# Altium footprint library WR-MJ.PcbLib: 101 footprints (part 5 of 7)
Each footprint in its own frame and in the unit in brackets; x right, y up, seen from the top. Pads: shape width x height; smd on the part's side, far side on the other; paste and mask are expansions set on the pad; w line width, h text height; cw(c..) or ccw(c..) is an arc to the next point about the centre after c.
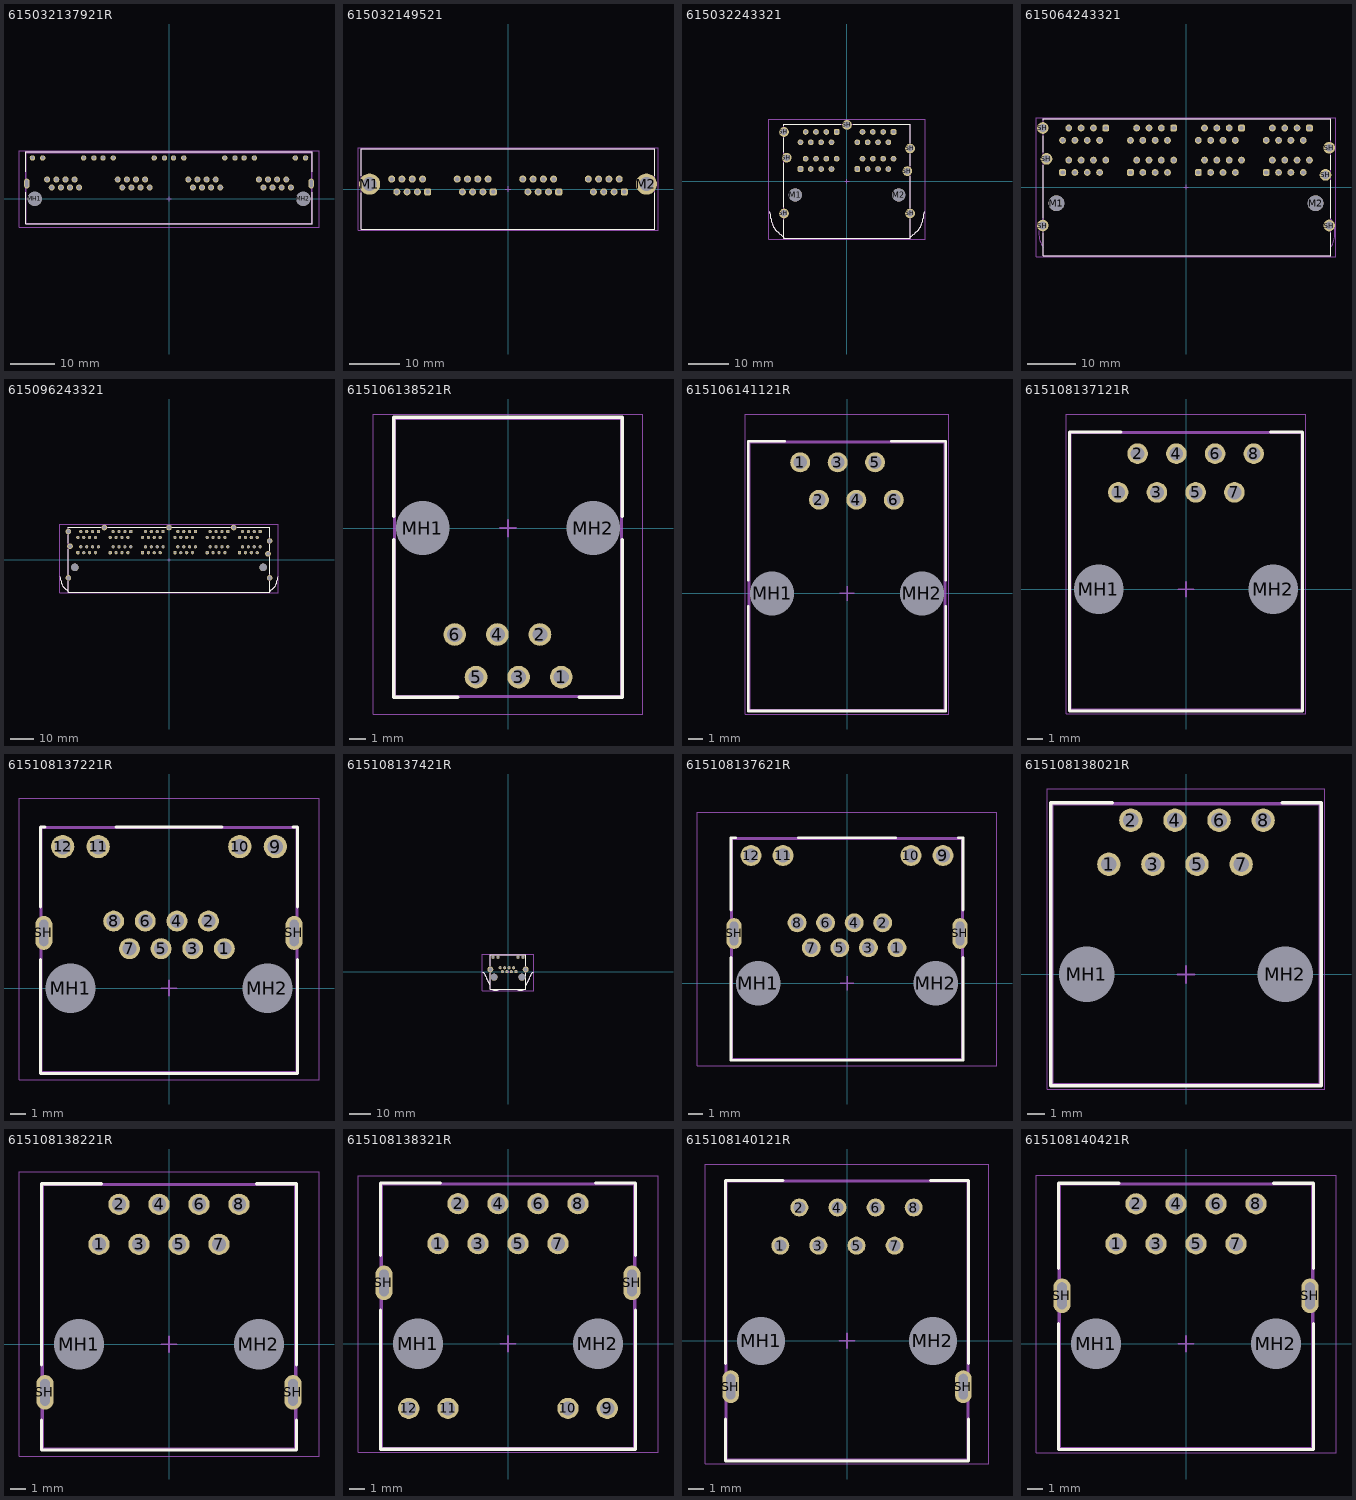
[diagram p4: the footprints below, top view; thin cyan lines are the x and y axes]

## 615032137921R [mm] "Modular Jak"
pads (52):
  round 1.35 hole 0.9: A1(-20.055,2.54) A2(-21.075,4.32) A3(-22.095,2.54) A4(-23.115,4.32) A5(-24.135,2.54) A6(-25.155,4.32) A7(-26.175,2.54) A8(-27.195,4.32) B1(-4.305,2.54) B2(-5.325,4.32) B3(-6.345,2.54) B4(-7.365,4.32) B5(-8.385,2.54) B6(-9.405,4.32) B7(-10.425,2.54) B8(-11.445,4.32) C1(11.445,2.54) C2(10.425,4.32) C3(9.405,2.54) C4(8.385,4.32) C5(7.365,2.54) C6(6.345,4.32) C7(5.325,2.54) C8(4.305,4.32) D1(27.195,2.54) D2(26.175,4.32) D3(25.155,2.54) D4(24.135,4.32) D5(23.115,2.54) D6(22.095,4.32) D7(21.075,2.54) D8(20.055,4.32)
  round 1.2 hole 0.8: A9(-16.765,9.14) A10(-19.055,9.14) A11(-28.195,9.14) A12(-30.485,9.14) B9(-1.015,9.14) B10(-3.305,9.14) B11(-12.445,9.14) B12(-14.735,9.14) C9(14.735,9.14) C10(12.445,9.14) C11(3.305,9.14) C12(1.015,9.14) D9(30.485,9.14) D10(28.195,9.14) D11(19.055,9.14) D12(16.765,9.14)
  round 3.15 hole 3.25 unplated: MH1(-29.975,0) MH2(29.975,0)
  oval 1.2x2.2 hole 0.6 slot 1.6 at 90 deg: SH(-31.75,3.43) SH(31.75,3.43)
Top Overlay:
  lines w0.2: -32,1.5 -32,-5.525 32,-5.525 32,1.5 ; -32,6.1 -32,10.475 32,10.475 32,6.1
Top Paste:
  drawing of 50 lines, arcs and shapes, not listed
Assembly Notes:
  text "Stencil Thickness 120 um" at -10.109,-7.841 h2
Top Assembly:
  lines w0.1: -32,-5.525 -32,10.475 32,10.475 32,-5.525 -32,-5.525
Top Designator:
  text ".Designator" at -3.647,-0.357 h1
Top 3D Body:
  lines w0.1: -31.875,-5.4 31.875,-5.4 31.875,10.35 -31.875,10.35 -31.875,-5.4
Top Courtyard:
  lines w0.05: -33.481,-6.38 -33.481,10.8 33.481,10.8 33.481,-6.38 -33.481,-6.38
Top Component Center:
  lines w0.1: -0.5,0 0.5,0 ; 0,-0.5 0,0.5
3D body "615032137921R.stp": height 14.83, standoff -3.51, extent -33.281,-6.18 33.281,10.6

## 615032149521 [mm] "Modular Jack Horizontal Plastic 8P8C Assembly Tab Up"
height 15.4
pads (34):
  rrect50% 1.4x1.4 hole 0.9: A1(-15.93,-0.57) B1(-2.93,-0.57) C1(10.07,-0.57) D1(23.07,-0.57)
  round 1.4 hole 0.9: A2(-16.95,1.97) A3(-17.97,-0.57) A4(-18.99,1.97) A5(-20.01,-0.57) A6(-21.03,1.97) A7(-22.05,-0.57) A8(-23.07,1.97) B2(-3.95,1.97) B3(-4.97,-0.57) B4(-5.99,1.97) B5(-7.01,-0.57) B6(-8.03,1.97) B7(-9.05,-0.57) B8(-10.07,1.97) C2(9.05,1.97) C3(8.03,-0.57) C4(7.01,1.97) C5(5.99,-0.57) C6(4.97,1.97) C7(3.95,-0.57) C8(2.93,1.97) D2(22.05,1.97) D3(21.03,-0.57) D4(20.01,1.97) D5(18.99,-0.57) D6(17.97,1.97) D7(16.95,-0.57) D8(15.93,1.97)
  round 4.2 hole 2.8: M1(-27.45,0.97) M2(27.45,0.97)
Top Overlay:
  lines w0.2: -29.14,-0.75 -29.14,-8 29.14,-8 29.14,-0.75 ; -29.14,2.65 -29.14,8 29.14,8 29.14,2.65
Top Assembly:
  lines w0.1: -29.14,-8 29.14,-8 29.14,8 -29.14,8 -29.14,-8
Top Designator:
  text ".Designator" at -3.647,-0.357 h1
Top Courtyard:
  lines w0.05: -29.75,-8.2 -29.75,8.2 29.75,8.2 29.75,-8.2 -29.75,-8.2
Top Component Center:
  lines w0.1: -0.5,0 0.5,0 ; 0,-0.5 0,0.5
3D body "615032149521.stp": height 15.53, standoff -4.01, extent -29.14,-8 29.14,8

## 615032243321 [mm] "Modular Jack Horizontal Shielded 2x Dual Stacked with EMI Panel Finger 8P8C Tab Up&Down"
height 25.29
pads (41):
  rrect50% 1.4x1.4 hole 0.89: A1(-2.54,12.17) B1(11.43,12.17) C1(-11.43,3.05) D1(2.54,3.05)
  round 1.4 hole 0.89: A2(-3.81,9.63) A3(-5.08,12.17) A4(-6.35,9.63) A5(-7.62,12.17) A6(-8.89,9.63) A7(-10.16,12.17) A8(-11.43,9.63) B2(10.16,9.63) B3(8.89,12.17) B4(7.62,9.63) B5(6.35,12.17) B6(5.08,9.63) B7(3.81,12.17) B8(2.54,9.63) C2(-10.16,5.59) C3(-8.89,3.05) C4(-7.62,5.59) C5(-6.35,3.05) C6(-5.08,5.59) C7(-3.81,3.05) C8(-2.54,5.59) D2(3.81,5.59) D3(5.08,3.05) D4(6.35,5.59) D5(7.62,3.05) D6(8.89,5.59) D7(10.16,3.05) D8(11.43,5.59)
  round 3.25 hole 3.25 unplated: M1(-12.7,-3.3) M2(12.7,-3.3)
  round 2.4 hole 1.6: SH(-15.495,-7.87) SH(-15.495,12.17) SH(-14.82,5.84) SH(0,13.9) SH(14.82,2.54) SH(15.495,-7.87) SH(15.495,8.1)
Top Overlay:
  lines w0.2: -18.991,-7.388 cw(c-27.747,-9.899) -18.677,-9.062 ccw(c-14.174,-8.889) -17.251,-12.18 ccw(c-13.756,-9.252) -16.336,-13.012 ccw(c-9.917,-7.318) -15.585,-13.76 ; -15.585,-9.35 -15.585,-14 15.585,-14 15.585,-9.34 ; -15.585,-6.39 -15.585,4.55 ; -15.585,7.13 -15.585,10.7 ; -15.585,13.64 -15.585,14 -1.485,14 ; 1.485,14 15.585,14 15.585,9.55 ; 15.585,-13.76 ccw(c9.917,-7.318) 16.336,-13.012 ccw(c13.756,-9.252) 17.252,-12.18 ccw(c14.175,-8.889) 18.677,-9.062 cw(c27.747,-9.899) 18.991,-7.388 ; 15.585,-6.4 15.585,1.28 ; 15.585,3.8 15.585,6.65
Top Assembly:
  lines w0.1: -18.991,-7.388 cw(c-27.747,-9.899) -18.677,-9.062 ccw(c-14.174,-8.889) -17.251,-12.18 ccw(c-13.756,-9.252) -16.336,-13.012 ccw(c-9.917,-7.318) -15.585,-13.76 ; 15.585,-13.76 ccw(c9.917,-7.318) 16.336,-13.012 ccw(c13.756,-9.252) 17.252,-12.18 ccw(c14.175,-8.889) 18.677,-9.062 cw(c27.747,-9.899) 18.991,-7.388 ; -15.585,-14 15.585,-14 15.585,14 -15.585,14 -15.585,-14
Top Designator:
  text ".Designator" at -3.647,-0.357 h1
Top Courtyard:
  lines w0.05: -19.285,-14.2 19.285,-14.2 19.285,15.3 -19.285,15.3 -19.285,-14.2
Top Component Center:
  lines w0.1: -0.5,0 0.5,0 ; 0,-0.5 0,0.5
3D body "615032243321 (rev1).stp": height 29.84, standoff -4.57, extent -19.085,-14 19.085,14

## 615064243321 [mm] "Modular Jack Horizontal Shielded 2x4 Stacked with EMI Panel Finger 8P8C Tab Up&Down"
height 25.3
pads (72):
  rrect50% 1.4x1.4 hole 0.9: A1(-16.51,12.14) B1(-2.54,12.14) C1(11.43,12.14) D1(25.4,12.14) E1(-25.4,3) F1(-11.43,3) G1(2.54,3) H1(16.51,3)
  round 1.4 hole 0.9: A2(-17.78,9.6) A3(-19.05,12.14) A4(-20.32,9.6) A5(-21.59,12.14) A6(-22.86,9.6) A7(-24.13,12.14) A8(-25.4,9.6) B2(-3.81,9.6) B3(-5.08,12.14) B4(-6.35,9.6) B5(-7.62,12.14) B6(-8.89,9.6) B7(-10.16,12.14) B8(-11.43,9.6) C2(10.16,9.6) C3(8.89,12.14) C4(7.62,9.6) C5(6.35,12.14) C6(5.08,9.6) C7(3.81,12.14) C8(2.54,9.6) D2(24.13,9.6) D3(22.86,12.14) D4(21.59,9.6) D5(20.32,12.14) D6(19.05,9.6) D7(17.78,12.14) D8(16.51,9.6) E2(-24.13,5.54) E3(-22.86,3) E4(-21.59,5.54) E5(-20.32,3) E6(-19.05,5.54) E7(-17.78,3) E8(-16.51,5.54) F2(-10.16,5.54) F3(-8.89,3) F4(-7.62,5.54) F5(-6.35,3) F6(-5.08,5.54) F7(-3.81,3) F8(-2.54,5.54) G2(3.81,5.54) G3(5.08,3) G4(6.35,5.54) G5(7.62,3) G6(8.89,5.54) G7(10.16,3) G8(11.43,5.54) H2(17.78,5.54) H3(19.05,3) H4(20.32,5.54) H5(21.59,3) H6(22.86,5.54) H7(24.13,3) H8(25.4,5.54)
  round 3.25 hole 3.25 unplated: M1(-26.67,-3.35) M2(26.67,-3.35)
  round 2.4 hole 1.6: SH(-29.47,-7.92) SH(-29.47,12.15) SH(-28.71,5.8) SH(28.71,2.5) SH(29.47,-7.92) SH(29.47,8.08)
Top Overlay:
  lines w0.2: -29.42,-9.45 -29.42,-14.1 29.78,-14.1 29.78,-9.45 ; -29.42,-6.4 -29.42,4.45 ; -29.42,7.15 -29.42,10.6 ; -29.42,13.7 -29.42,14.1 29.78,14.1 29.78,9.6 ; 29.78,-6.4 29.78,1.4 ; 29.78,3.6 29.78,6.55
Top Assembly:
  lines w0.1: -29.42,-12.45 cw(c-24.62,-9.45) -29.42,-6.45 ; 29.78,-12.45 ccw(c24.98,-9.45) 29.78,-6.45 ; -29.42,-14.1 -29.42,14.1 29.78,14.1 29.78,-14.1 -29.42,-14.1
Top Designator:
  text ".Designator" at -3.647,-0.357 h1
Top Courtyard:
  lines w0.05: -30.87,-14.3 30.87,-14.3 30.87,14.3 -30.87,14.3 -30.87,-14.3
Top Component Center:
  lines w0.1: -0.5,0 0.5,0 ; 0,-0.5 0,0.5
3D body "615064243321 (rev1).stp": height 26.85, standoff -3.25, extent -30.22,-14.1 30.576,14.1

## 615096243321 [mm] "Modular Jack Horizontal Shielded 2x6 Stacked with EMI Panel Finger 8P8C Tab Up&Down"
height 25.2
pads (107):
  rrect50% 1.4x1.4 hole 0.89: A1(-30.48,12.27) B1(-16.51,12.27) C1(-2.54,12.27) D1(11.43,12.27) E1(25.4,12.27) F1(39.37,12.27) G1(-39.37,3.15) H1(-25.4,3.15) I1(-11.43,3.15) J1(2.54,3.15) K1(16.51,3.15) L1(30.48,3.15)
  round 1.4 hole 0.89: A2(-31.75,9.73) A3(-33.02,12.27) A4(-34.29,9.73) A5(-35.56,12.27) A6(-36.83,9.73) A7(-38.1,12.27) A8(-39.37,9.73) B2(-17.78,9.73) B3(-19.05,12.27) B4(-20.32,9.73) B5(-21.59,12.27) B6(-22.86,9.73) B7(-24.13,12.27) B8(-25.4,9.73) C2(-3.81,9.73) C3(-5.08,12.27) C4(-6.35,9.73) C5(-7.62,12.27) C6(-8.89,9.73) C7(-10.16,12.27) C8(-11.43,9.73) D2(10.16,9.73) D3(8.89,12.27) D4(7.62,9.73) D5(6.35,12.27) D6(5.08,9.73) D7(3.81,12.27) D8(2.54,9.73) E2(24.13,9.73) E3(22.86,12.27) E4(21.59,9.73) E5(20.32,12.27) E6(19.05,9.73) E7(17.78,12.27) E8(16.51,9.73) F2(38.1,9.73) F3(36.83,12.27) F4(35.56,9.73) F5(34.29,12.27) F6(33.02,9.73) F7(31.75,12.27) F8(30.48,9.73) G2(-38.1,5.69) G3(-36.83,3.15) G4(-35.56,5.69) G5(-34.29,3.15) G6(-33.02,5.69) G7(-31.75,3.15) G8(-30.48,5.69) H2(-24.13,5.69) H3(-22.86,3.15) H4(-21.59,5.69) H5(-20.32,3.15) H6(-19.05,5.69) H7(-17.78,3.15) H8(-16.51,5.69) I2(-10.16,5.69) I3(-8.89,3.15) I4(-7.62,5.69) I5(-6.35,3.15) I6(-5.08,5.69) I7(-3.81,3.15) I8(-2.54,5.69) J2(3.81,5.69) J3(5.08,3.15) J4(6.35,5.69) J5(7.62,3.15) J6(8.89,5.69) J7(10.16,3.15) J8(11.43,5.69) K2(17.78,5.69) K3(19.05,3.15) K4(20.32,5.69) K5(21.59,3.15) K6(22.86,5.69) K7(24.13,3.15) K8(25.4,5.69) L2(31.75,5.69) L3(33.02,3.15) L4(34.29,5.69) L5(35.56,3.15) L6(36.83,5.69) L7(38.1,3.15) L8(39.37,5.69)
  round 3.25 hole 3.25 unplated: M1(-40.64,-3.2) M2(40.64,-3.2)
  round 2.4 hole 1.6: SH(-43.435,-7.77) SH(-43.435,12.27) SH(-42.76,5.94) SH(-27.94,14) SH(0,14) SH(27.94,14) SH(42.76,2.64) SH(43.435,-7.77) SH(43.435,8.2)
Top Overlay:
  lines w0.2: -46.926,-7.288 cw(c-55.682,-9.799) -46.612,-8.962 ccw(c-42.11,-8.789) -45.187,-12.08 ccw(c-41.691,-9.152) -44.271,-12.912 ccw(c-37.852,-7.218) -43.52,-13.66 ; -43.52,-9.25 -43.52,-13.9 43.52,-13.9 43.52,-9.29 ; -43.52,-6.29 -43.52,4.65 ; -43.52,7.23 -43.52,10.8 ; -43.52,13.74 -43.52,14.1 -29.42,14.1 ; -26.46,14.1 -1.47,14.1 ; 1.47,14.1 26.46,14.1 ; 29.41,14.1 43.52,14.1 43.52,9.7 ; 43.52,-13.66 ccw(c37.852,-7.218) 44.271,-12.912 ccw(c41.691,-9.152) 45.187,-12.08 ccw(c42.11,-8.789) 46.612,-8.962 cw(c55.682,-9.799) 46.926,-7.288 ; 43.52,-6.25 43.52,1.38 ; 43.52,3.9 43.52,6.7
Top Assembly:
  lines w0.1: -46.926,-7.288 cw(c-55.682,-9.799) -46.612,-8.962 ccw(c-42.11,-8.789) -45.187,-12.08 ccw(c-41.691,-9.152) -44.271,-12.912 ccw(c-37.852,-7.218) -43.52,-13.66 ; 43.52,-13.66 ccw(c37.852,-7.218) 44.271,-12.912 ccw(c41.691,-9.152) 45.187,-12.08 ccw(c42.11,-8.789) 46.612,-8.962 cw(c55.682,-9.799) 46.926,-7.288 ; -43.52,-13.9 43.52,-13.9 43.52,14.1 -43.52,14.1 -43.52,-13.9
Top Designator:
  text ".Designator" at -3.647,-0.357 h1
Top Courtyard:
  lines w0.05: -47.22,-14.1 47.22,-14.1 47.22,15.4 -47.22,15.4 -47.22,-14.1
Top Component Center:
  lines w0.1: -0.5,0 0.5,0 ; 0,-0.5 0,0.5
3D body "615096243321 (rev1).stp": height 30.15, standoff -3.15, extent -47.02,-13.9 47.02,14.1

## 615106138521R [mm] "Modular Jak"
height 16.25
pads (8):
  round 1.35 hole 0.9: 1(3.175,-8.89) 2(1.905,-6.35) 3(0.635,-8.89) 4(-0.635,-6.35) 5(-1.905,-8.89) 6(-3.175,-6.35)
  round 3.1 hole 3.2 unplated: MH1(-5.08,0) MH2(5.08,0)
Top Overlay:
  lines w0.2: -6.805,-0.7 -6.805,-10.1 -3.005,-10.1 ; -6.805,0.7 -6.805,6.6 6.805,6.6 6.805,0.7 ; 4.245,-10.1 6.805,-10.1 6.805,-0.7
Top Paste:
  region: -4.025,-4.35 -4.025,-7.55 -2.325,-7.55 -2.325,-4.35
  region: -1.485,-4.35 -1.485,-7.55 0.215,-7.55 0.215,-4.35
  region: 1.055,-4.35 1.055,-7.55 2.755,-7.55 2.755,-4.35
  region: -1.055,-10.89 -1.055,-7.69 -2.755,-7.69 -2.755,-10.89
  region: 1.485,-10.89 1.485,-7.69 -0.215,-7.69 -0.215,-10.89
  region: 4.025,-10.89 4.025,-7.69 2.325,-7.69 2.325,-10.89
Assembly Notes:
  text "Stencil Thickness 120 um" at -7.571,-12.18 h1.5
Top Assembly:
  lines w0.1: -6.805,-10.1 -6.805,6.6 6.805,6.6 6.805,-10.1 -6.805,-10.1
Top Designator:
  text ".Designator" at -3.647,-0.357 h1
Top 3D Body:
  lines w0.1: -6.73,-10 -6.73,6.5 6.73,6.5 6.73,-10 -6.73,-10
Top Courtyard:
  lines w0.05: -8.03,-11.09 8.03,-11.09 8.03,6.8 -8.03,6.8 -8.03,-11.09
Top Component Center:
  lines w0.1: -0.5,0 0.5,0 ; 0,-0.5 0,0.5
3D body "615106138521R.stp": height 16.29, standoff -1.37, extent -7.83,-10 7.83,6.5

## 615106141121R [mm] "Modular Jak"
height 25.3
pads (8):
  round 1.35 hole 0.9: 1(-3.175,8.89) 2(-1.905,6.35) 3(-0.635,8.89) 4(0.635,6.35) 5(1.905,8.89) 6(3.175,6.35)
  round 2.9 hole 3 unplated: MH1(-5.08,0) MH2(5.08,0)
Top Overlay:
  lines w0.2: -6.7,-0.9 -6.7,-7.98 6.7,-7.98 6.7,-0.9 ; -6.7,0.9 -6.7,10.32 -4.25,10.32 ; 3,10.32 6.7,10.32 6.7,0.9
Top Paste:
  region: -4.025,11.97 -2.325,11.97 -2.325,7.69 -4.025,7.69
  region: -1.485,11.97 0.215,11.97 0.215,7.69 -1.485,7.69
  region: 1.055,11.97 2.755,11.97 2.755,7.69 1.055,7.69
  region: 2.325,3.27 4.025,3.27 4.025,7.55 2.325,7.55
  region: -0.215,3.27 1.485,3.27 1.485,7.55 -0.215,7.55
  region: -2.755,3.27 -1.055,3.27 -1.055,7.55 -2.755,7.55
Top Assembly:
  lines w0.1: -6.7,-7.98 6.7,-7.98 6.7,10.32 -6.7,10.32 -6.7,-7.98
Top Designator:
  text ".Designator" at -3.647,-0.357 h1
Top 3D Body:
  lines w0.1: -6.6,-7.88 6.6,-7.88 6.6,10.22 -6.6,10.22 -6.6,-7.88
Top Courtyard:
  lines w0.05: -6.9,-8.18 6.9,-8.18 6.9,12.17 -6.9,12.17 -6.9,-8.18
Top Component Center:
  lines w0.1: -0.5,0 0.5,0 ; 0,-0.5 0,0.5
3D body "615106141121R.stp": height 11.59, standoff -1.81, extent -6.6,-7.88 6.6,10.22

## 615108137121R [mm] "Modular Jak"
pads (10):
  round 1.35 hole 0.9: 1(-4.445,6.35) 2(-3.175,8.89) 3(-1.905,6.35) 4(-0.635,8.89) 5(0.635,6.35) 6(1.905,8.89) 7(3.175,6.35) 8(4.445,8.89)
  round 3.15 hole 3.25 unplated: MH1(-5.715,0) MH2(5.715,0)
Top Overlay:
  lines w0.2: -4.25,10.32 -7.65,10.32 -7.65,-7.98 7.65,-7.98 7.65,-0.9 7.65,10.32 5.55,10.32
Top Paste:
  region: 5.295,11.29 5.295,7.69 3.595,7.69 3.595,11.29
  region: 2.755,11.29 2.755,7.69 1.055,7.69 1.055,11.29
  region: 0.215,11.29 0.215,7.69 -1.485,7.69 -1.485,11.29
  region: -2.325,11.29 -2.325,7.69 -4.025,7.69 -4.025,11.29
  region: 2.325,3.95 2.325,7.55 4.025,7.55 4.025,3.95
  region: -0.215,3.95 -0.215,7.55 1.485,7.55 1.485,3.95
  region: -2.755,3.95 -2.755,7.55 -1.055,7.55 -1.055,3.95
  region: -5.295,3.95 -5.295,7.55 -3.595,7.55 -3.595,3.95
Assembly Notes:
  text "Stencil Thickness 120 um" at -7.571,-9.28 h1.5
Top Assembly:
  lines w0.1: -7.65,-7.98 7.65,-7.98 7.65,-0.9 7.65,10.32 -7.65,10.32 -7.65,-7.98
Top Designator:
  text ".Designator" at -3.647,-0.357 h1
Top 3D Body:
  lines w0.1: -7.55,-7.88 7.55,-7.88 7.55,10.22 -7.55,10.22 -7.55,-7.88
Top Courtyard:
  lines w0.05: -7.85,-8.18 -7.85,11.49 7.85,11.49 7.85,-8.18 -7.85,-8.18
Top Component Center:
  lines w0.1: -0.5,0 0.5,0 ; 0,-0.5 0,0.5
3D body "615108137121R.stp": height 11.69, standoff -1.71, extent -7.55,-7.88 7.55,10.22

## 615108137221R [mm] "Modular Jak"
pads (16):
  round 1.35 hole 0.9: 1(3.57,2.54) 2(2.55,4.32) 3(1.53,2.54) 4(0.51,4.32) 5(-0.51,2.54) 6(-1.53,4.32) 7(-2.55,2.54) 8(-3.57,4.32)
  round 1.5 hole 1: 9(6.86,9.13) 10(4.57,9.13) 11(-4.57,9.13) 12(-6.86,9.13)
  round 3.1 hole 3.2 unplated: MH1(-6.35,0) MH2(6.35,0)
  oval 1.1x2.2 hole 0.6 slot 1.7 at 90 deg: SH(-8.075,3.56) SH(8.075,3.56)
Top Overlay:
  lines w0.2: -8.3,1.84 -8.3,-5.5 8.3,-5.5 8.3,1.84 ; -8.3,5.24 -8.3,10.4 -8,10.4 ; -3.43,10.4 3.43,10.4 ; 8,10.4 8.3,10.4 8.3,5.24
Top Paste:
  region: 4.42,-0.36 4.42,3.34 2.72,3.34 2.72,-0.36
  region: 2.38,-0.36 2.38,3.34 0.68,3.34 0.68,-0.36
  region: 0.34,-0.36 0.34,3.34 -1.36,3.34 -1.36,-0.36
  region: -1.7,-0.36 -1.7,3.34 -3.4,3.34 -3.4,-0.36
  region: 1.7,7.22 1.7,3.52 3.4,3.52 3.4,7.22
  region: -0.34,7.22 -0.34,3.52 1.36,3.52 1.36,7.22
  region: -2.38,7.22 -2.38,3.52 -0.68,3.52 -0.68,7.22
  region: -4.42,7.22 -4.42,3.52 -2.72,3.52 -2.72,7.22
  region: 6.01,12.03 6.01,8.33 7.71,8.33 7.71,12.03
  region: 3.72,12.03 3.72,8.33 5.42,8.33 5.42,12.03
  region: -5.42,12.03 -5.42,8.33 -3.72,8.33 -3.72,12.03
  region: -7.71,12.03 -7.71,8.33 -6.01,8.33 -6.01,12.03
  region: 6.675,5.01 9.475,5.01 9.475,2.11 6.675,2.11
  region: -9.475,5.01 -6.675,5.01 -6.675,2.11 -9.475,2.11
Assembly Notes:
  text "Stencil Thickness 120 um" at -7.571,-6.98 h1.5
Top Assembly:
  lines w0.1: -8.3,-5.5 8.3,-5.5 8.3,10.4 -8.3,10.4 -8.3,-5.5
Top Designator:
  text ".Designator" at -3.647,-0.357 h1
Top 3D Body:
  lines w0.1: -8.2,-5.4 8.2,-5.4 8.2,10.3 -8.2,10.3 -8.2,-5.4
Top Courtyard:
  lines w0.05: -9.675,-5.898 -9.675,12.23 9.675,12.23 9.675,-5.898 -9.675,-5.898
Top Component Center:
  lines w0.1: -0.5,0 0.5,0 ; 0,-0.5 0,0.5
3D body "615108137221R.stp": height 13.45, standoff -2.65, extent -8.2,-5.698 8.2,10.3

## 615108137421R [mm] "Modular Jack Horizonal Shielded  with LED and EMI Panel Finger 8P8C  THR Compatible Tab Up"
height 13.3
pads (16):
  rrect50% 1.4x1.4 hole 0.9: 1(3.57,0.09)
  round 1.4 hole 0.9: 2(2.55,1.87) 3(1.53,0.09) 4(0.51,1.87) 5(-0.51,0.09) 6(-1.53,1.87) 7(-2.55,0.09) 8(-3.57,1.87)
  round 1.5 hole 1: 9(6.86,6.68) 10(4.57,6.68) 11(-4.57,6.68) 12(-6.86,6.68)
  round 3.2 hole 3.2 unplated: M1(-6.35,-2.45) M2(6.35,-2.45)
  round 2.7 hole 1.8: SH(-8.075,1.11) SH(8.075,1.11)
Top Overlay:
  lines w0.2: -11.44,-0.33 cw(c-11.308,-0.68) -10.958,-0.548 ccw(c26.511,16.052) -9.841,-2.87 ccw(c27.537,13.934) -8.815,-4.988 ccw(c6,3.953) -8.355,-5.708 cw(c-9.434,-6.311) -8.206,-6.168 ; -8.2,-0.55 -8.2,-7.85 8.2,-7.85 8.2,-0.55 ; -8.2,2.8 -8.2,7.85 8.2,7.85 8.2,2.8 ; -7.331,-7.851 ccw(c-6.167,-6.753) -6.07,-8.35 -5.37,-8.35 ccw(c-5.273,-6.753) -4.109,-7.851 ; 4.099,-7.851 ccw(c5.263,-6.753) 5.36,-8.35 6.06,-8.35 ccw(c6.157,-6.753) 7.321,-7.851 ; 8.206,-6.168 cw(c9.434,-6.311) 8.355,-5.708 ccw(c-6,3.953) 8.815,-4.988 ccw(c-27.537,13.934) 9.841,-2.87 ccw(c-26.511,16.052) 10.958,-0.548 cw(c11.308,-0.68) 11.44,-0.33
Top Assembly:
  lines w0.1: -11.44,-0.33 cw(c-11.308,-0.68) -10.958,-0.548 ccw(c26.511,16.052) -9.841,-2.87 ccw(c27.537,13.934) -8.815,-4.988 ccw(c6,3.953) -8.355,-5.708 cw(c-9.434,-6.311) -8.206,-6.168 ; -7.331,-7.851 ccw(c-6.167,-6.753) -6.07,-8.35 -5.37,-8.35 ccw(c-5.273,-6.753) -4.109,-7.851 ; 4.099,-7.851 ccw(c5.263,-6.753) 5.36,-8.35 6.06,-8.35 ccw(c6.157,-6.753) 7.321,-7.851 ; 8.206,-6.168 cw(c9.434,-6.311) 8.355,-5.708 ccw(c-6,3.953) 8.815,-4.988 ccw(c-27.537,13.934) 9.841,-2.87 ccw(c-26.511,16.052) 10.958,-0.548 cw(c11.308,-0.68) 11.44,-0.33 ; -8.2,-7.85 8.2,-7.85 8.2,7.85 -8.2,7.85 -8.2,-7.85
Top Designator:
  text ".Designator" at -3.647,-0.357 h1
Top Courtyard:
  lines w0.05: -11.72,-8.55 -11.72,8.05 11.72,8.05 11.72,-8.55 -11.72,-8.55
Top Component Center:
  lines w0.1: -0.5,0 0.5,0 ; 0,-0.5 0,0.5
3D body "615108137421R (rev1).stp": height 16.84, standoff -2.32, extent -11.516,-8.35 11.516,7.85

## 615108137621R [mm] "Modular Jak"
height 13.44
pads (16):
  round 1.35 hole 0.9: 1(3.57,2.54) 2(2.55,4.32) 3(1.53,2.54) 4(0.51,4.32) 5(-0.51,2.54) 6(-1.53,4.32) 7(-2.55,2.54) 8(-3.57,4.32)
  round 1.5 hole 1: 9(6.86,9.13) 10(4.57,9.13) 11(-4.57,9.13) 12(-6.86,9.13)
  round 3.1 hole 3.2 unplated: MH1(-6.35,0) MH2(6.35,0)
  oval 1.1x2.2 hole 0.6 slot 1.7 at 90 deg: SH(-8.075,3.56) SH(8.075,3.56)
Top Overlay:
  lines w0.2: -8.3,1.84 -8.3,-5.5 8.3,-5.5 8.3,1.84 ; -8.3,5.24 -8.3,10.4 -7.95,10.4 ; -3.48,10.4 3.48,10.4 ; 7.95,10.4 8.3,10.4 8.3,5.24
Top Paste:
  region: 6.675,5.01 9.475,5.01 9.475,2.11 6.675,2.11
  region: -9.475,5.01 -6.675,5.01 -6.675,2.11 -9.475,2.11
  region: -4.42,7.22 -4.42,3.52 -2.72,3.52 -2.72,7.22
  region: -2.38,7.22 -2.38,3.52 -0.68,3.52 -0.68,7.22
  region: -0.34,7.22 -0.34,3.52 1.36,3.52 1.36,7.22
  region: 1.7,7.22 1.7,3.52 3.4,3.52 3.4,7.22
  region: -3.4,-0.36 -3.4,3.34 -1.7,3.34 -1.7,-0.36
  region: -1.36,-0.36 -1.36,3.34 0.34,3.34 0.34,-0.36
  region: 0.68,-0.36 0.68,3.34 2.38,3.34 2.38,-0.36
  region: 2.72,-0.36 2.72,3.34 4.42,3.34 4.42,-0.36
  region: -7.71,12.03 -7.71,8.33 -6.01,8.33 -6.01,12.03
  region: -5.42,12.03 -5.42,8.33 -3.72,8.33 -3.72,12.03
  region: 3.72,12.03 3.72,8.33 5.42,8.33 5.42,12.03
  region: 6.01,12.03 6.01,8.33 7.71,8.33 7.71,12.03
Assembly Notes:
  text "Stencil Thickness 120 um" at -7.571,-6.88 h1.5
Top Assembly:
  lines w0.1: -8.3,-5.5 -8.3,10.4 8.3,10.4 8.3,-5.5 -8.3,-5.5
Top Designator:
  text ".Designator" at -3.647,-0.357 h1
Top 3D Body:
  lines w0.1: -8.2,-5.4 8.2,-5.4 8.2,10.3 -8.2,10.3 -8.2,-5.4
Top Courtyard:
  lines w0.05: -10.72,-5.898 10.72,-5.898 10.72,12.23 -10.72,12.23 -10.72,-5.898
Top Component Center:
  lines w0.1: -0.5,0 0.5,0 ; 0,-0.5 0,0.5
3D body "615108137621R.stp": height 15.72, standoff -2.7, extent -10.52,-5.698 10.52,10.3

## 615108138021R [mm] "Modular Jak"
height 16.2
pads (10):
  round 1.35 hole 0.9: 1(-4.445,6.35) 2(-3.175,8.89) 3(-1.905,6.35) 4(-0.635,8.89) 5(0.635,6.35) 6(1.905,8.89) 7(3.175,6.35) 8(4.445,8.89)
  round 3.1 hole 3.2 unplated: MH1(-5.715,0) MH2(5.715,0)
Top Overlay:
  lines w0.2: -4.25,9.9 -7.8,9.9 -7.8,-6.4 7.8,-6.4 7.8,9.9 5.55,9.9
Top Paste:
  region: -5.295,7.55 -3.595,7.55 -3.595,4.75 -5.295,4.75
  region: -2.755,7.55 -1.055,7.55 -1.055,4.75 -2.755,4.75
  region: -0.215,7.55 1.485,7.55 1.485,4.75 -0.215,4.75
  region: 2.325,7.55 4.025,7.55 4.025,4.75 2.325,4.75
  region: -2.325,7.69 -4.025,7.69 -4.025,10.49 -2.325,10.49
  region: 0.215,7.69 -1.485,7.69 -1.485,10.49 0.215,10.49
  region: 2.755,7.69 1.055,7.69 1.055,10.49 2.755,10.49
  region: 5.295,7.69 3.595,7.69 3.595,10.49 5.295,10.49
Assembly Notes:
  text "Stencil Thickness 120 um" at -7.571,-7.73 h1.5
Top Assembly:
  lines w0.1: -7.8,-6.4 -7.8,9.9 7.8,9.9 7.8,-6.4 -7.8,-6.4
Top Designator:
  text ".Designator" at -3.647,-0.357 h1
Top 3D Body:
  lines w0.1: -7.7,-6.3 -7.7,9.8 7.7,9.8 7.7,-6.3 -7.7,-6.3
Top Courtyard:
  lines w0.05: -8,-6.6 8,-6.6 8,10.69 -8,10.69 -8,-6.6
Top Component Center:
  lines w0.1: -0.5,0 0.5,0 ; 0,-0.5 0,0.5
3D body "615108138021R.stp": height 17.45, standoff -1.85, extent -8,-6.95 8,10.75

## 615108138221R [mm] "Modular Jak"
height 16.5
pads (12):
  round 1.35 hole 0.9: 1(-4.445,6.35) 2(-3.175,8.89) 3(-1.905,6.35) 4(-0.635,8.89) 5(0.635,6.35) 6(1.905,8.89) 7(3.175,6.35) 8(4.445,8.89)
  round 3.1 hole 3.2 unplated: MH1(-5.715,0) MH2(5.715,0)
  oval 1.1x2.2 hole 0.6 slot 1.7 at 90 deg: SH(-7.875,-3.05) SH(7.875,-3.05)
Top Overlay:
  lines w0.2: -8.1,-4.8 -8.1,-6.7 8.1,-6.7 8.1,-4.8 ; -8.1,-1.3 -8.1,10.2 -4.3,10.2 ; 5.57,10.2 8.1,10.2 8.1,-1.3
Top Paste:
  region: -9.325,-1.55 -6.425,-1.55 -6.425,-4.55 -9.325,-4.55
  region: 6.425,-1.55 6.425,-4.55 9.325,-4.55 9.325,-1.55
  region: -5.295,7.55 -3.595,7.55 -3.595,4.75 -5.295,4.75
  region: -2.755,7.55 -1.055,7.55 -1.055,4.75 -2.755,4.75
  region: -0.215,7.55 1.485,7.55 1.485,4.75 -0.215,4.75
  region: 2.325,7.55 4.025,7.55 4.025,4.75 2.325,4.75
  region: -4.025,7.69 -2.325,7.69 -2.325,10.49 -4.025,10.49
  region: -1.485,7.69 0.215,7.69 0.215,10.49 -1.485,10.49
  region: 1.055,7.69 2.755,7.69 2.755,10.49 1.055,10.49
  region: 3.595,7.69 5.295,7.69 5.295,10.49 3.595,10.49
Top Assembly:
  lines w0.1: -8.1,-6.7 -8.1,10.2 8.1,10.2 8.1,-6.7 -8.1,-6.7
Top Designator:
  text ".Designator" at -3.647,-0.357 h1
Top 3D Body:
  lines w0.1: -8,-6.6 8,-6.6 8,10.1 -8,10.1 -8,-6.6
Top Courtyard:
  lines w0.05: -9.525,-7.1 -9.525,10.95 9.525,10.95 9.525,-7.1 -9.525,-7.1
Top Component Center:
  lines w0.1: -0.5,0 0.5,0 ; 0,-0.5 0,0.5
3D body "615108138221R.stp": height 17.6, standoff -1.8, extent -8.21,-6.95 8.29,10.75

## 615108138321R [mm] "Modular Jak"
pads (16):
  round 1.35 hole 0.9: 1(-4.445,6.35) 2(-3.175,8.89) 3(-1.905,6.35) 4(-0.635,8.89) 5(0.635,6.35) 6(1.905,8.89) 7(3.175,6.35) 8(4.445,8.89) 9(6.3,-4.11) 10(3.81,-4.11) 11(-3.81,-4.11) 12(-6.3,-4.11)
  round 3.1 hole 3.2 unplated: MH1(-5.715,0) MH2(5.715,0)
  oval 1.1x2.2 hole 0.6 slot 1.7 at 90 deg: SH(-7.875,3.86) SH(7.875,3.86)
Top Overlay:
  lines w0.2: -8.1,2.12 -8.1,-6.7 8.1,-6.7 8.1,2.12 ; -8.1,5.6 -8.1,10.2 -4.3,10.2 ; 5.57,10.2 8.1,10.2 8.1,5.6
Top Paste:
  region: 5.45,-3.11 7.15,-3.11 7.15,-5.11 5.45,-5.11
  region: 2.96,-3.11 4.66,-3.11 4.66,-5.11 2.96,-5.11
  region: -4.66,-3.11 -2.96,-3.11 -2.96,-5.11 -4.66,-5.11
  region: -7.15,-3.11 -5.45,-3.11 -5.45,-5.11 -7.15,-5.11
  region: -2.325,7.69 -2.325,10.49 -4.025,10.49 -4.025,7.69
  region: 0.215,7.69 0.215,10.49 -1.485,10.49 -1.485,7.69
  region: 2.755,7.69 2.755,10.49 1.055,10.49 1.055,7.69
  region: 5.295,7.69 5.295,10.49 3.595,10.49 3.595,7.69
  region: 2.325,7.55 2.325,4.75 4.025,4.75 4.025,7.55
  region: -0.215,7.55 -0.215,4.75 1.485,4.75 1.485,7.55
  region: -2.755,7.55 -2.755,4.75 -1.055,4.75 -1.055,7.55
  region: -5.295,7.55 -5.295,4.75 -3.595,4.75 -3.595,7.55
  region: -9.325,5.36 -6.425,5.36 -6.425,2.36 -9.325,2.36
  region: 6.425,5.36 9.325,5.36 9.325,2.36 6.425,2.36
Assembly Notes:
  text "Stencil Thickness 120 um" at -7.571,-8 h1.5
Top Assembly:
  lines w0.1: -8.1,-6.7 8.1,-6.7 8.1,10.2 -8.1,10.2 -8.1,-6.7
Top Designator:
  text ".Designator" at -3.647,-0.357 h1
Top 3D Body:
  lines w0.1: -8,-6.6 8,-6.6 8,10.1 -8,10.1 -8,-6.6
Top Courtyard:
  lines w0.05: -9.525,-6.9 9.525,-6.9 9.525,10.67 -9.525,10.67 -9.525,-6.9
Top Component Center:
  lines w0.1: -0.5,0 0.5,0 ; 0,-0.5 0,0.5
3D body "615108138321R.stp": height 17.4, standoff -2.69, extent -8.038,-6.9 8,10.8

## 615108140121R [mm] "Modular Jak"
pads (12):
  round 1.2 hole 0.8: 1(-4.445,6.35) 2(-3.175,8.89) 3(-1.905,6.35) 4(-0.635,8.89) 5(0.635,6.35) 6(1.905,8.89) 7(3.175,6.35) 8(4.445,8.89)
  round 3.1 hole 3.2 unplated: MH1(-5.715,0) MH2(5.715,0)
  oval 1.1x2.2 hole 0.6 slot 1.7 at 90 deg: SH(-7.75,-3.05) SH(7.75,-3.05)
Top Overlay:
  lines w0.2: -8.1,-5.2 -8.1,-8 8.1,-8 8.1,-5.2 ; -8.1,-1.5 -8.1,10.7 -4.25,10.7 ; 5.55,10.7 8.1,10.7 8.1,-1.5
Top Paste:
  region: 4.025,3.65 4.025,7.15 2.325,7.15 2.325,3.65
  region: 1.485,3.65 1.485,7.15 -0.215,7.15 -0.215,3.65
  region: -1.055,3.65 -1.055,7.15 -2.755,7.15 -2.755,3.65
  region: -3.595,3.65 -3.595,7.15 -5.295,7.15 -5.295,3.65
  region: -4.025,11.59 -4.025,8.09 -2.325,8.09 -2.325,11.59
  region: -1.485,11.59 -1.485,8.09 0.215,8.09 0.215,11.59
  region: 1.055,11.59 1.055,8.09 2.755,8.09 2.755,11.59
  region: 3.595,11.59 3.595,8.09 5.295,8.09 5.295,11.59
  region: 6.25,-1.75 9.25,-1.75 9.25,-4.95 6.25,-4.95
  region: -9.25,-1.75 -6.25,-1.75 -6.25,-4.95 -9.25,-4.95
Assembly Notes:
  text "Stencil Thickness 120 um" at -7.571,-9.28 h1.5
Top Assembly:
  lines w0.1: -8.1,-8 8.1,-8 8.1,10.7 -8.1,10.7 -8.1,-8
Top Designator:
  text ".Designator" at -3.647,-0.357 h1
Top 3D Body:
  lines w0.1: -8,-7.9 8,-7.9 8,10.6 -8,10.6 -8,-7.9
Top Courtyard:
  lines w0.05: -9.45,-8.2 -9.45,11.79 9.45,11.79 9.45,-8.2 -9.45,-8.2
Top Component Center:
  lines w0.1: -0.5,0 0.5,0 ; 0,-0.5 0,0.5
3D body "615008140121.stp": height 12.09, standoff -2.02, extent -8.14,-7.9 8.14,10.6

## 615108140421R [mm] "Modular Jak"
height 16.5
pads (12):
  round 1.35 hole 0.9: 1(-4.445,6.35) 2(-3.175,8.89) 3(-1.905,6.35) 4(-0.635,8.89) 5(0.635,6.35) 6(1.905,8.89) 7(3.175,6.35) 8(4.445,8.89)
  round 3.1 hole 3.2 unplated: MH1(-5.715,0) MH2(5.715,0)
  oval 1.1x2.2 hole 0.6 slot 1.7 at 90 deg: SH(-7.875,3.05) SH(7.875,3.05)
Top Overlay:
  lines w0.2: -8.1,1.3 -8.1,-6.7 8.1,-6.7 8.1,1.3 ; -8.1,4.8 -8.1,10.2 -4.25,10.2 ; 5.55,10.2 8.1,10.2 8.1,4.8
Top Paste:
  region: 2.325,7.55 2.325,4.75 4.025,4.75 4.025,7.55
  region: -0.215,7.55 -0.215,4.75 1.485,4.75 1.485,7.55
  region: 5.295,7.69 5.295,10.49 3.595,10.49 3.595,7.69
  region: 2.755,7.69 2.755,10.49 1.055,10.49 1.055,7.69
  region: 0.215,7.69 0.215,10.49 -1.485,10.49 -1.485,7.69
  region: -2.325,7.69 -2.325,10.49 -4.025,10.49 -4.025,7.69
  region: -2.755,7.55 -2.755,4.75 -1.055,4.75 -1.055,7.55
  region: -5.295,7.55 -5.295,4.75 -3.595,4.75 -3.595,7.55
  region: 6.425,4.55 6.425,1.55 9.325,1.55 9.325,4.55
  region: -9.325,4.55 -9.325,1.55 -6.425,1.55 -6.425,4.55
Assembly Notes:
  text "Stencil Thickness 120 um" at -7.571,-7.98 h1.5
Top Assembly:
  lines w0.1: -8.1,-6.7 8.1,-6.7 8.1,10.2 -8.1,10.2 -8.1,-6.7
Top Designator:
  text ".Designator" at -3.647,-0.357 h1
Top 3D Body:
  lines w0.1: -8,-6.6 -8,10.1 8,10.1 8,-6.6 -8,-6.6
Top Courtyard:
  lines w0.05: -9.525,-6.9 9.525,-6.9 9.525,10.69 -9.525,10.69 -9.525,-6.9
Top Component Center:
  lines w0.1: -0.5,0 0.5,0 ; 0,-0.5 0,0.5
3D body "615108140421R.stp": height 17.55, standoff -1.85, extent -8.038,-6.9 8,10.8